# Altium footprint library CMT752580SMTTR.PcbLib: 1 footprints
Each footprint in its own frame and in the unit in brackets; x right, y up, seen from the top. Pads: shape width x height; smd on the part's side, far side on the other; paste and mask are expansions set on the pad; w line width, h text height; cw(c..) or ccw(c..) is an arc to the next point about the centre after c.
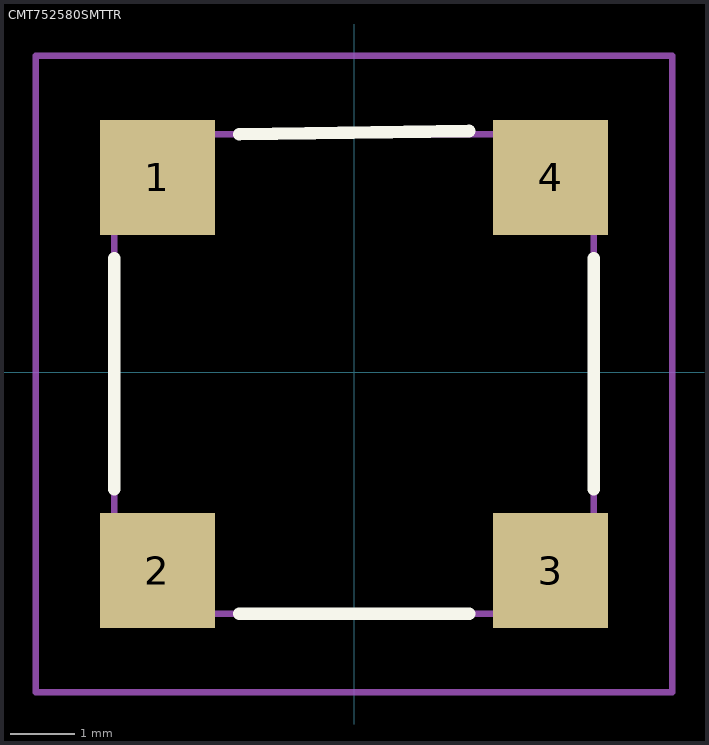
[diagram p0: the footprint, top view; thin cyan lines are the x and y axes]

## CMT752580SMTTR [mm]
pads (4):
  rect 1.8x1.8 smd: 1(-3.075,3.05) 2(-3.075,-3.1) 3(3.075,-3.1) 4(3.075,3.05)
Top Overlay:
  lines w0.2: -3.75,-1.825 -3.75,1.785 ; -1.793,-3.775 1.8,-3.775 ; -1.793,3.725 1.8,3.775 ; 3.75,-1.825 3.75,1.785
Mechanical 15:
  lines w0.1: -3.75,-3.775 3.75,-3.775 3.75,3.725 -3.75,3.725 -3.75,-3.775
Mechanical 20:
  lines w0.1: -4.975,-5 4.975,-5 4.975,4.95 -4.975,4.95 -4.975,-5